# Altium schematic symbol library Mess_Sensors.SchLib: 3 symbols
Pins are listed as number, name and electrical type; pins without a type are passive.

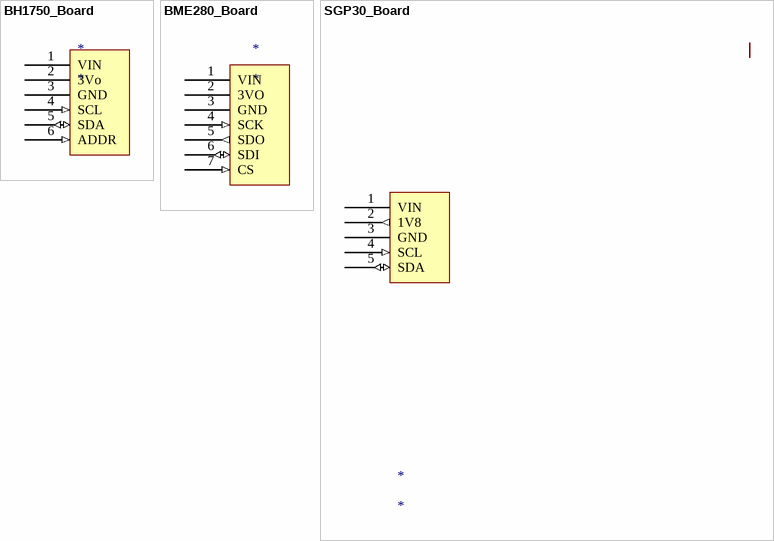
[diagram p0: symbols BH1750_Board to SGP30_Board]

## BH1750_Board
designator *
pins: 1 VIN (power), 2 3Vo (power), 3 GND (power), 4 SCL (in), 5 SDA (io), 6 ADDR (in)

## BME280_Board
designator *
pins: 1 VIN (power), 2 3VO (power), 3 GND (power), 4 SCK (in), 5 SDO (out), 6 SDI (io), 7 CS (in)

## SGP30_Board
designator *
pins: 1 VIN (power), 2 1V8 (out), 3 GND (power), 4 SCL (in), 5 SDA (io)